# Altium footprint library LCD.PcbLib: 1 footprints
Each footprint in its own frame and in the unit in brackets; x right, y up, seen from the top. Pads: shape width x height; smd on the part's side, far side on the other; paste and mask are expansions set on the pad; w line width, h text height; cw(c..) or ccw(c..) is an arc to the next point about the centre after c.
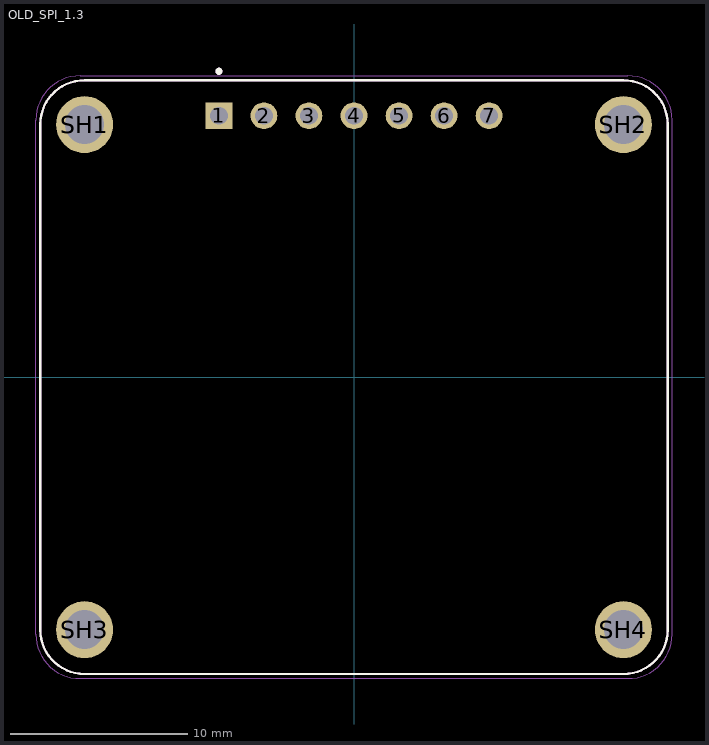
[diagram p0: the footprint, top view; thin cyan lines are the x and y axes]

## OLD_SPI_1.3 [mm] "LCD_AOM12864A0-1.3BW-ANO"
height 5
pads (11):
  rect 1.508x1.508 / inner round 1.508 / far side rect 1.508x1.508 hole 1 mask+0.102: 1(-7.62,14.75)
  round 1.508 hole 1 mask+0.102: 2(-5.08,14.75) 3(-2.54,14.75) 4(0,14.75) 5(2.54,14.75) 6(5.08,14.75) 7(7.62,14.75)
  round 3.216 hole 2.2 mask+0.102: SH1(-15.2,14.25) SH2(15.2,14.25) SH3(-15.2,-14.25) SH4(15.2,-14.25)
Top Overlay:
  circle w0.2: c-7.62,17.254 r0.1
  lines w0.127: -17.7,-14.25 ccw(c-15.2,-14.25) -15.2,-16.75 15.2,-16.75 ccw(c15.2,-14.25) 17.7,-14.25 17.7,14.25 ccw(c15.2,14.25) 15.2,16.75 -15.2,16.75 ccw(c-15.2,14.25) -17.7,14.25 -17.7,-14.25
Mechanical 13:
  circle w0.2: c-7.62,17.254 r0.1
  lines w0.127: -17.7,-14.25 ccw(c-15.2,-14.25) -15.2,-16.75 15.2,-16.75 ccw(c15.2,-14.25) 17.7,-14.25 17.7,14.25 ccw(c15.2,14.25) 15.2,16.75 -15.2,16.75 ccw(c-15.2,14.25) -17.7,14.25 -17.7,-14.25
Mechanical 15:
  lines w0.05: -17.95,-14.5 ccw(c-15.45,-14.5) -15.45,-17 15.45,-17 ccw(c15.45,-14.5) 17.95,-14.5 17.95,14.5 ccw(c15.45,14.5) 15.45,17 -15.45,17 ccw(c-15.45,14.5) -17.95,14.5 -17.95,-14.5
3D body "step_temp.STEP": height 5, standoff 0, extent -17.7,-16.75 17.7,16.75